# Altium schematic symbol library Guitar_Pedal.SchLib: 2 symbols
Pins are listed as number, name and electrical type; pins without a type are passive.

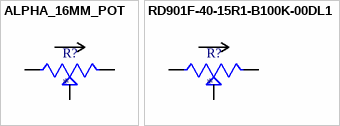
[diagram p0: symbols ALPHA_16MM_POT to RD901F-40-15R1-B100K-00DL1]

## ALPHA_16MM_POT
designator R?
Potentiometers 16mm; Value: *; Taper: *
footprint ALPHA_16MM_POT
pins: 1, 2, 3

## RD901F-40-15R1-B100K-00DL1
designator R?
Potentiometers 9mm Linear 100K Round Shaft; Value: *; Taper: *
footprint POT_RD901F-40-15R1-B100K-00DL1
pins: 1, 2, 3